# EAGLE library part CD74AC161 (library Library_v4)
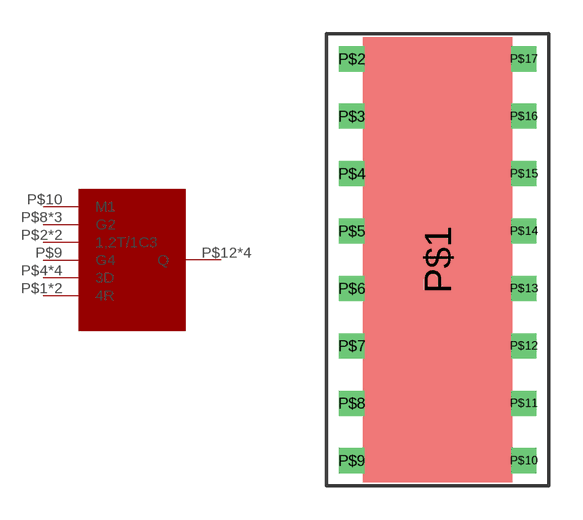
[diagram p0: symbol with the pads of CD74AC161; footprint CD74AC161]

Designator prefix -

## CD74AC161  [CD74AC161]
P$1  4R
P$2  1,2T/1C3
P$3  1,2T/1C3
P$4  3D
P$5  3D
P$6  3D
P$7  3D
P$8  G2
P$9  G4
P$10  M1
P$11  G2
P$12  Q
P$13  Q
P$14  Q
P$15  Q
P$16  G2
P$17  4R

## Footprint CD74AC161 (pad centres in mm)
smd 6.604 x 19.685: P$1 0,0
drill 0.6 square: P$2 -3.81,8.89; P$3 -3.81,6.35; P$4 -3.81,3.81; P$5 -3.81,1.27; P$6 -3.81,-1.27; P$7 -3.81,-3.81; P$8 -3.81,-6.35; P$9 -3.81,-8.89; P$10 3.81,-8.89; P$11 3.81,-6.35; P$12 3.81,-3.81; P$13 3.81,-1.27; P$14 3.81,1.27; P$15 3.81,3.81; P$16 3.81,6.35; P$17 3.81,8.89